# Altium schematic symbol library SG2002_QFN88_38_20230301_4L_V1.3_16.2_Library.SchLib: 126 symbols (part 5 of 5)
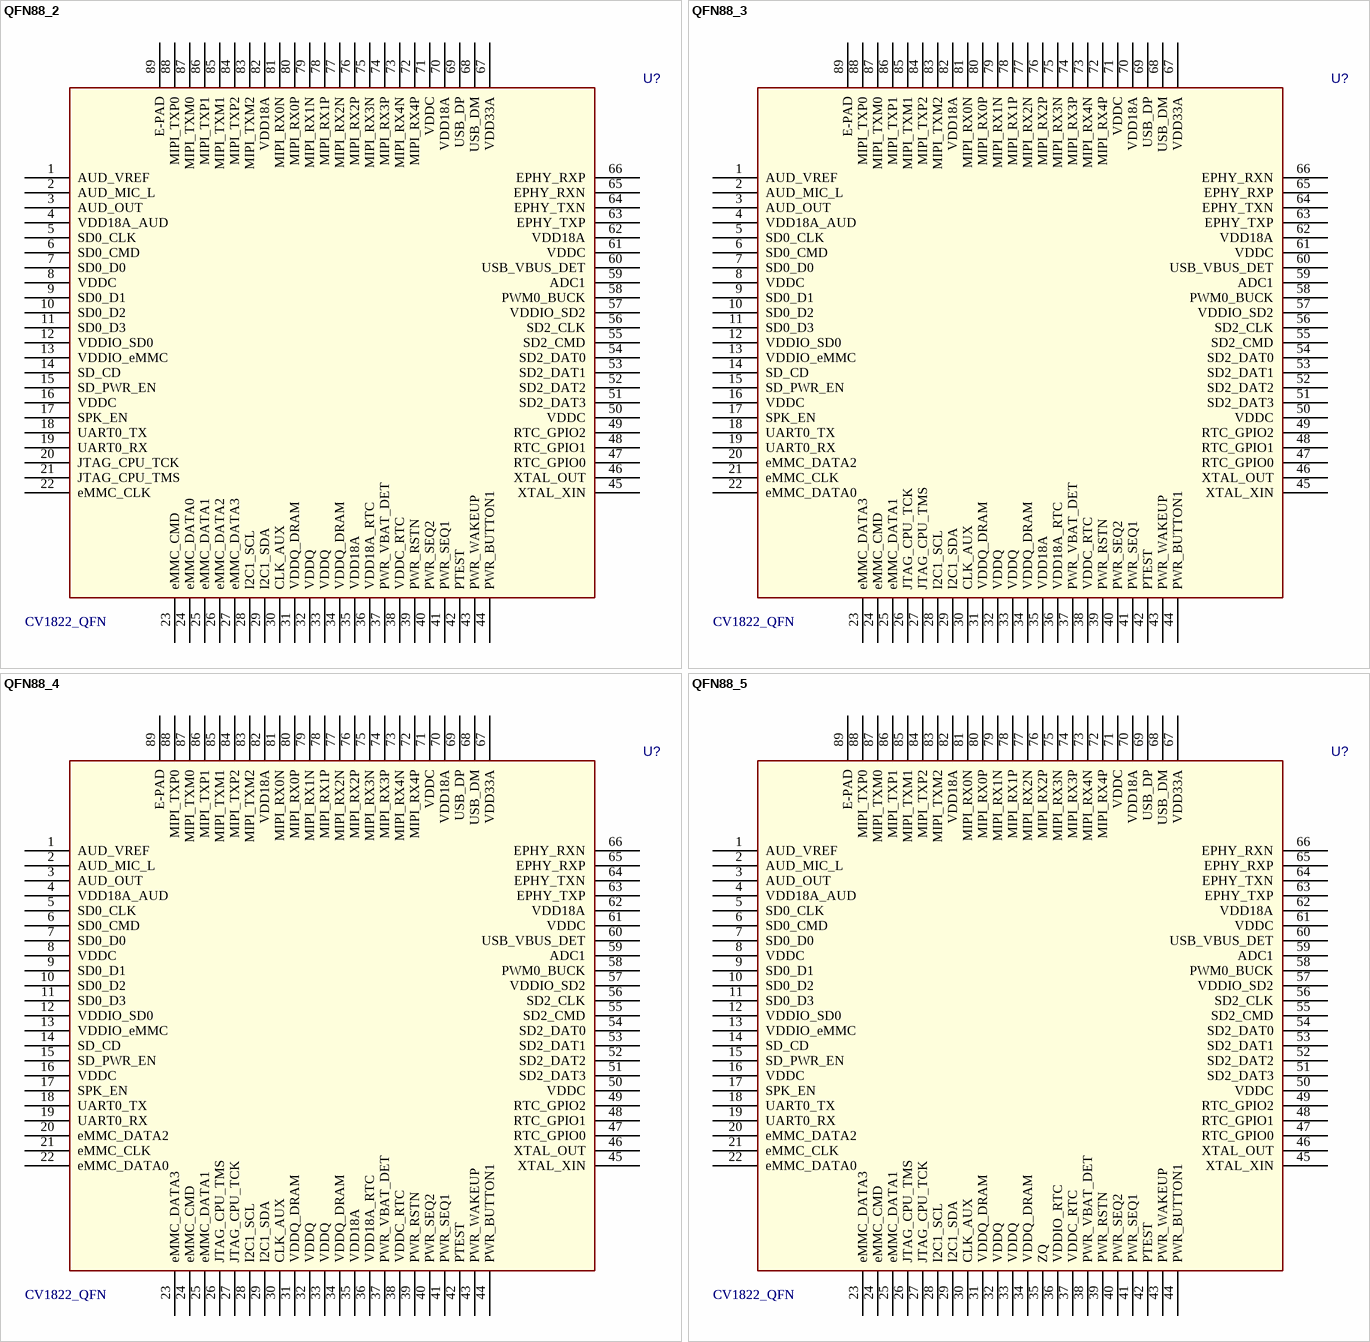
[diagram p53: symbols QFN88_2 to QFN88_5]

## QFN88_3
designator U?, comment CV1822_QFN
Value: CV1822_QFN
pins: 1 AUD_VREF, 2 AUD_MIC_L, 3 AUD_OUT, 4 VDD18A_AUD, 5 SD0_CLK, 6 SD0_CMD, 7 SD0_D0, 8 VDDC, 9 SD0_D1, 10 SD0_D2, 11 SD0_D3, 12 VDDIO_SD0, 13 VDDIO_eMMC, 14 SD_CD, 15 SD_PWR_EN, 16 VDDC, 17 SPK_EN, 18 UART0_TX, 19 UART0_RX, 20 eMMC_DATA2, 21 eMMC_CLK, 22 eMMC_DATA0, 23 eMMC_DATA3, 24 eMMC_CMD, 25 eMMC_DATA1, 26 JTAG_CPU_TCK, 27 JTAG_CPU_TMS, 28 I2C1_SCL, 29 I2C1_SDA, 30 CLK_AUX, 31 VDDQ_DRAM, 32 VDDQ, 33 VDDQ, 34 VDDQ_DRAM, 35 VDD18A, 36 VDD18A_RTC, 37 PWR_VBAT_DET, 38 VDDC_RTC, 39 PWR_RSTN, 40 PWR_SEQ2, 41 PWR_SEQ1, 42 PTEST, 43 PWR_WAKEUP, 44 PWR_BUTTON1, 45 XTAL_XIN, 46 XTAL_OUT, 47 RTC_GPIO0, 48 RTC_GPIO1, 49 RTC_GPIO2, 50 VDDC, 51 SD2_DAT3, 52 SD2_DAT2, 53 SD2_DAT1, 54 SD2_DAT0, 55 SD2_CMD, 56 SD2_CLK, 57 VDDIO_SD2, 58 PWM0_BUCK, 59 ADC1, 60 USB_VBUS_DET, 61 VDDC, 62 VDD18A, 63 EPHY_TXP, 64 EPHY_TXN, 65 EPHY_RXP, 66 EPHY_RXN, 67 VDD33A, 68 USB_DM, 69 USB_DP, 70 VDD18A, 71 VDDC, 72 MIPI_RX4P, 73 MIPI_RX4N, 74 MIPI_RX3P, 75 MIPI_RX3N, 76 MIPI_RX2P, 77 MIPI_RX2N, 78 MIPI_RX1P, 79 MIPI_RX1N, 80 MIPI_RX0P, 81 MIPI_RX0N, 82 VDD18A, 83 MIPI_TXM2, 84 MIPI_TXP2, 85 MIPI_TXM1, 86 MIPI_TXP1, 87 MIPI_TXM0, 88 MIPI_TXP0, 89 E-PAD

## QFN88_4
designator U?, comment CV1822_QFN
Value: CV1822_QFN
pins: 1 AUD_VREF, 2 AUD_MIC_L, 3 AUD_OUT, 4 VDD18A_AUD, 5 SD0_CLK, 6 SD0_CMD, 7 SD0_D0, 8 VDDC, 9 SD0_D1, 10 SD0_D2, 11 SD0_D3, 12 VDDIO_SD0, 13 VDDIO_eMMC, 14 SD_CD, 15 SD_PWR_EN, 16 VDDC, 17 SPK_EN, 18 UART0_TX, 19 UART0_RX, 20 eMMC_DATA2, 21 eMMC_CLK, 22 eMMC_DATA0, 23 eMMC_DATA3, 24 eMMC_CMD, 25 eMMC_DATA1, 26 JTAG_CPU_TMS, 27 JTAG_CPU_TCK, 28 I2C1_SCL, 29 I2C1_SDA, 30 CLK_AUX, 31 VDDQ_DRAM, 32 VDDQ, 33 VDDQ, 34 VDDQ_DRAM, 35 VDD18A, 36 VDD18A_RTC, 37 PWR_VBAT_DET, 38 VDDC_RTC, 39 PWR_RSTN, 40 PWR_SEQ2, 41 PWR_SEQ1, 42 PTEST, 43 PWR_WAKEUP, 44 PWR_BUTTON1, 45 XTAL_XIN, 46 XTAL_OUT, 47 RTC_GPIO0, 48 RTC_GPIO1, 49 RTC_GPIO2, 50 VDDC, 51 SD2_DAT3, 52 SD2_DAT2, 53 SD2_DAT1, 54 SD2_DAT0, 55 SD2_CMD, 56 SD2_CLK, 57 VDDIO_SD2, 58 PWM0_BUCK, 59 ADC1, 60 USB_VBUS_DET, 61 VDDC, 62 VDD18A, 63 EPHY_TXP, 64 EPHY_TXN, 65 EPHY_RXP, 66 EPHY_RXN, 67 VDD33A, 68 USB_DM, 69 USB_DP, 70 VDD18A, 71 VDDC, 72 MIPI_RX4P, 73 MIPI_RX4N, 74 MIPI_RX3P, 75 MIPI_RX3N, 76 MIPI_RX2P, 77 MIPI_RX2N, 78 MIPI_RX1P, 79 MIPI_RX1N, 80 MIPI_RX0P, 81 MIPI_RX0N, 82 VDD18A, 83 MIPI_TXM2, 84 MIPI_TXP2, 85 MIPI_TXM1, 86 MIPI_TXP1, 87 MIPI_TXM0, 88 MIPI_TXP0, 89 E-PAD

## QFN88_5
designator U?, comment CV1822_QFN
Value: CV1822_QFN
pins: 1 AUD_VREF, 2 AUD_MIC_L, 3 AUD_OUT, 4 VDD18A_AUD, 5 SD0_CLK, 6 SD0_CMD, 7 SD0_D0, 8 VDDC, 9 SD0_D1, 10 SD0_D2, 11 SD0_D3, 12 VDDIO_SD0, 13 VDDIO_eMMC, 14 SD_CD, 15 SD_PWR_EN, 16 VDDC, 17 SPK_EN, 18 UART0_TX, 19 UART0_RX, 20 eMMC_DATA2, 21 eMMC_CLK, 22 eMMC_DATA0, 23 eMMC_DATA3, 24 eMMC_CMD, 25 eMMC_DATA1, 26 JTAG_CPU_TMS, 27 JTAG_CPU_TCK, 28 I2C1_SCL, 29 I2C1_SDA, 30 CLK_AUX, 31 VDDQ_DRAM, 32 VDDQ, 33 VDDQ, 34 VDDQ_DRAM, 35 ZQ, 36 VDDIO_RTC, 37 VDDC_RTC, 38 PWR_VBAT_DET, 39 PWR_RSTN, 40 PWR_SEQ2, 41 PWR_SEQ1, 42 PTEST, 43 PWR_WAKEUP, 44 PWR_BUTTON1, 45 XTAL_XIN, 46 XTAL_OUT, 47 RTC_GPIO0, 48 RTC_GPIO1, 49 RTC_GPIO2, 50 VDDC, 51 SD2_DAT3, 52 SD2_DAT2, 53 SD2_DAT1, 54 SD2_DAT0, 55 SD2_CMD, 56 SD2_CLK, 57 VDDIO_SD2, 58 PWM0_BUCK, 59 ADC1, 60 USB_VBUS_DET, 61 VDDC, 62 VDD18A, 63 EPHY_TXP, 64 EPHY_TXN, 65 EPHY_RXP, 66 EPHY_RXN, 67 VDD33A, 68 USB_DM, 69 USB_DP, 70 VDD18A, 71 VDDC, 72 MIPI_RX4P, 73 MIPI_RX4N, 74 MIPI_RX3P, 75 MIPI_RX3N, 76 MIPI_RX2P, 77 MIPI_RX2N, 78 MIPI_RX1P, 79 MIPI_RX1N, 80 MIPI_RX0P, 81 MIPI_RX0N, 82 VDD18A, 83 MIPI_TXM2, 84 MIPI_TXP2, 85 MIPI_TXM1, 86 MIPI_TXP1, 87 MIPI_TXM0, 88 MIPI_TXP0, 89 E-PAD

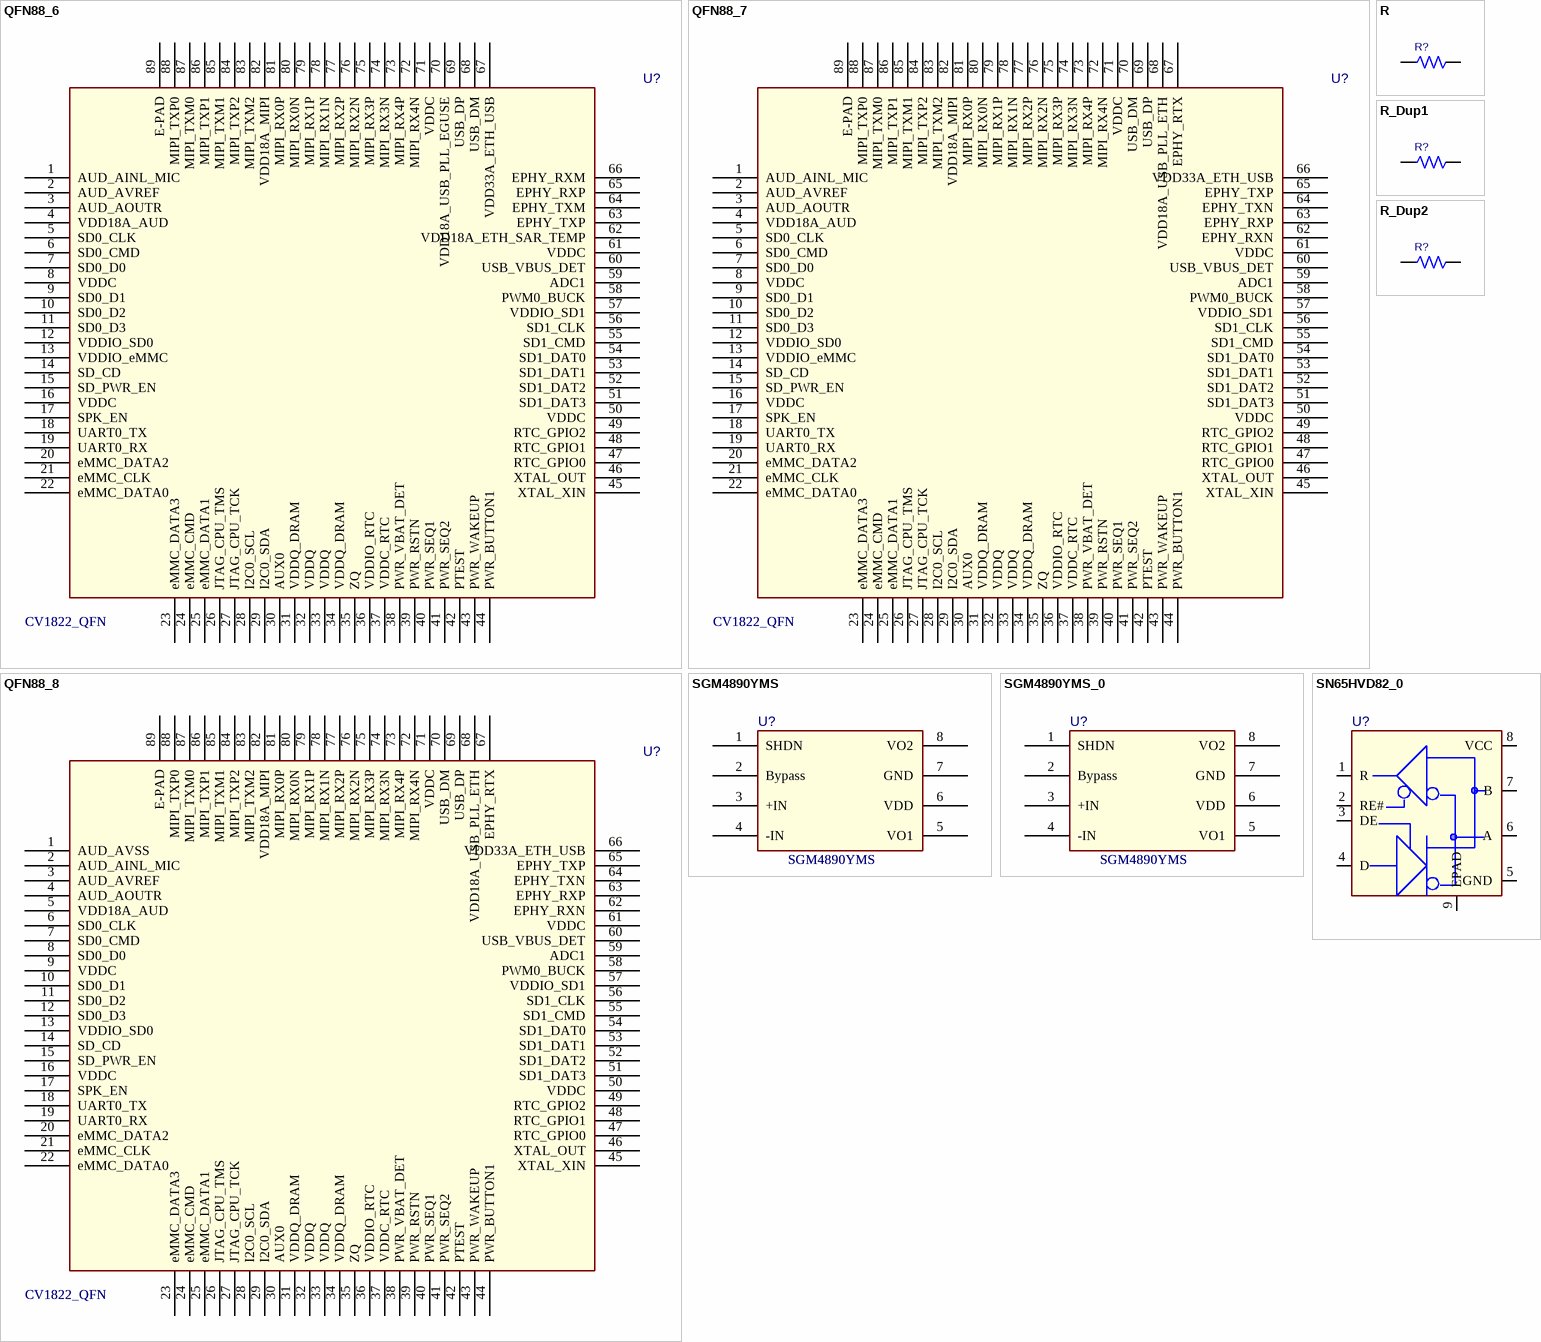
[diagram p46: symbols QFN88_6 to SN65HVD82_0]

## QFN88_6
designator U?, comment CV1822_QFN
Value: CV1822_QFN
pins: 1 AUD_AINL_MIC, 2 AUD_AVREF, 3 AUD_AOUTR, 4 VDD18A_AUD, 5 SD0_CLK, 6 SD0_CMD, 7 SD0_D0, 8 VDDC, 9 SD0_D1, 10 SD0_D2, 11 SD0_D3, 12 VDDIO_SD0, 13 VDDIO_eMMC, 14 SD_CD, 15 SD_PWR_EN, 16 VDDC, 17 SPK_EN, 18 UART0_TX, 19 UART0_RX, 20 eMMC_DATA2, 21 eMMC_CLK, 22 eMMC_DATA0, 23 eMMC_DATA3, 24 eMMC_CMD, 25 eMMC_DATA1, 26 JTAG_CPU_TMS, 27 JTAG_CPU_TCK, 28 I2C0_SCL, 29 I2C0_SDA, 30 AUX0, 31 VDDQ_DRAM, 32 VDDQ, 33 VDDQ, 34 VDDQ_DRAM, 35 ZQ, 36 VDDIO_RTC, 37 VDDC_RTC, 38 PWR_VBAT_DET, 39 PWR_RSTN, 40 PWR_SEQ1, 41 PWR_SEQ2, 42 PTEST, 43 PWR_WAKEUP, 44 PWR_BUTTON1, 45 XTAL_XIN, 46 XTAL_OUT, 47 RTC_GPIO0, 48 RTC_GPIO1, 49 RTC_GPIO2, 50 VDDC, 51 SD1_DAT3, 52 SD1_DAT2, 53 SD1_DAT1, 54 SD1_DAT0, 55 SD1_CMD, 56 SD1_CLK, 57 VDDIO_SD1, 58 PWM0_BUCK, 59 ADC1, 60 USB_VBUS_DET, 61 VDDC, 62 VDD18A_ETH_SAR_TEMP, 63 EPHY_TXP, 64 EPHY_TXM, 65 EPHY_RXP, 66 EPHY_RXM, 67 VDD33A_ETH_USB, 68 USB_DM, 69 USB_DP, 70 VDD18A_USB_PLL_EGUSE, 71 VDDC, 72 MIPI_RX4N, 73 MIPI_RX4P, 74 MIPI_RX3N, 75 MIPI_RX3P, 76 MIPI_RX2N, 77 MIPI_RX2P, 78 MIPI_RX1N, 79 MIPI_RX1P, 80 MIPI_RX0N, 81 MIPI_RX0P, 82 VDD18A_MIPI, 83 MIPI_TXM2, 84 MIPI_TXP2, 85 MIPI_TXM1, 86 MIPI_TXP1, 87 MIPI_TXM0, 88 MIPI_TXP0, 89 E-PAD

## QFN88_7
designator U?, comment CV1822_QFN
Value: CV1822_QFN
pins: 1 AUD_AINL_MIC, 2 AUD_AVREF, 3 AUD_AOUTR, 4 VDD18A_AUD, 5 SD0_CLK, 6 SD0_CMD, 7 SD0_D0, 8 VDDC, 9 SD0_D1, 10 SD0_D2, 11 SD0_D3, 12 VDDIO_SD0, 13 VDDIO_eMMC, 14 SD_CD, 15 SD_PWR_EN, 16 VDDC, 17 SPK_EN, 18 UART0_TX, 19 UART0_RX, 20 eMMC_DATA2, 21 eMMC_CLK, 22 eMMC_DATA0, 23 eMMC_DATA3, 24 eMMC_CMD, 25 eMMC_DATA1, 26 JTAG_CPU_TMS, 27 JTAG_CPU_TCK, 28 I2C0_SCL, 29 I2C0_SDA, 30 AUX0, 31 VDDQ_DRAM, 32 VDDQ, 33 VDDQ, 34 VDDQ_DRAM, 35 ZQ, 36 VDDIO_RTC, 37 VDDC_RTC, 38 PWR_VBAT_DET, 39 PWR_RSTN, 40 PWR_SEQ1, 41 PWR_SEQ2, 42 PTEST, 43 PWR_WAKEUP, 44 PWR_BUTTON1, 45 XTAL_XIN, 46 XTAL_OUT, 47 RTC_GPIO0, 48 RTC_GPIO1, 49 RTC_GPIO2, 50 VDDC, 51 SD1_DAT3, 52 SD1_DAT2, 53 SD1_DAT1, 54 SD1_DAT0, 55 SD1_CMD, 56 SD1_CLK, 57 VDDIO_SD1, 58 PWM0_BUCK, 59 ADC1, 60 USB_VBUS_DET, 61 VDDC, 62 EPHY_RXN, 63 EPHY_RXP, 64 EPHY_TXN, 65 EPHY_TXP, 66 VDD33A_ETH_USB, 67 EPHY_RTX, 68 VDD18A_USB_PLL_ETH, 69 USB_DP, 70 USB_DM, 71 VDDC, 72 MIPI_RX4N, 73 MIPI_RX4P, 74 MIPI_RX3N, 75 MIPI_RX3P, 76 MIPI_RX2N, 77 MIPI_RX2P, 78 MIPI_RX1N, 79 MIPI_RX1P, 80 MIPI_RX0N, 81 MIPI_RX0P, 82 VDD18A_MIPI, 83 MIPI_TXM2, 84 MIPI_TXP2, 85 MIPI_TXM1, 86 MIPI_TXP1, 87 MIPI_TXM0, 88 MIPI_TXP0, 89 E-PAD

## QFN88_8
designator U?, comment CV1822_QFN
Value: CV1822_QFN
pins: 1 AUD_AVSS, 2 AUD_AINL_MIC, 3 AUD_AVREF, 4 AUD_AOUTR, 5 VDD18A_AUD, 6 SD0_CLK, 7 SD0_CMD, 8 SD0_D0, 9 VDDC, 10 SD0_D1, 11 SD0_D2, 12 SD0_D3, 13 VDDIO_SD0, 14 SD_CD, 15 SD_PWR_EN, 16 VDDC, 17 SPK_EN, 18 UART0_TX, 19 UART0_RX, 20 eMMC_DATA2, 21 eMMC_CLK, 22 eMMC_DATA0, 23 eMMC_DATA3, 24 eMMC_CMD, 25 eMMC_DATA1, 26 JTAG_CPU_TMS, 27 JTAG_CPU_TCK, 28 I2C0_SCL, 29 I2C0_SDA, 30 AUX0, 31 VDDQ_DRAM, 32 VDDQ, 33 VDDQ, 34 VDDQ_DRAM, 35 ZQ, 36 VDDIO_RTC, 37 VDDC_RTC, 38 PWR_VBAT_DET, 39 PWR_RSTN, 40 PWR_SEQ1, 41 PWR_SEQ2, 42 PTEST, 43 PWR_WAKEUP, 44 PWR_BUTTON1, 45 XTAL_XIN, 46 XTAL_OUT, 47 RTC_GPIO0, 48 RTC_GPIO1, 49 RTC_GPIO2, 50 VDDC, 51 SD1_DAT3, 52 SD1_DAT2, 53 SD1_DAT1, 54 SD1_DAT0, 55 SD1_CMD, 56 SD1_CLK, 57 VDDIO_SD1, 58 PWM0_BUCK, 59 ADC1, 60 USB_VBUS_DET, 61 VDDC, 62 EPHY_RXN, 63 EPHY_RXP, 64 EPHY_TXN, 65 EPHY_TXP, 66 VDD33A_ETH_USB, 67 EPHY_RTX, 68 VDD18A_USB_PLL_ETH, 69 USB_DP, 70 USB_DM, 71 VDDC, 72 MIPI_RX4N, 73 MIPI_RX4P, 74 MIPI_RX3N, 75 MIPI_RX3P, 76 MIPI_RX2N, 77 MIPI_RX2P, 78 MIPI_RX1N, 79 MIPI_RX1P, 80 MIPI_RX0N, 81 MIPI_RX0P, 82 VDD18A_MIPI, 83 MIPI_TXM2, 84 MIPI_TXP2, 85 MIPI_TXM1, 86 MIPI_TXP1, 87 MIPI_TXM0, 88 MIPI_TXP0, 89 E-PAD

## R
designator R?
footprint R0402
pins: 1, 2

## R_Dup1
designator R?
pins: 1, 2

## R_Dup2
designator R?
pins: 1, 2

## SGM4890YMS
designator U?
Value: SGM4890YMS
pins: 1 SHDN, 2 Bypass, 3 +IN, 4 -IN, 5 VO1, 6 VDD, 7 GND, 8 VO2

## SGM4890YMS_0
designator U?, comment SGM4890YMS
Value: SGM4890YMS
pins: 1 SHDN, 2 Bypass, 3 +IN, 4 -IN, 5 VO1, 6 VDD, 7 GND, 8 VO2

## SN65HVD82_0
designator U?
footprint SOP8
pins: 1 R, 2 RE#, 3 DE, 4 D, 5 GND, 6 A, 7 B, 8 VCC, 9 EPAD

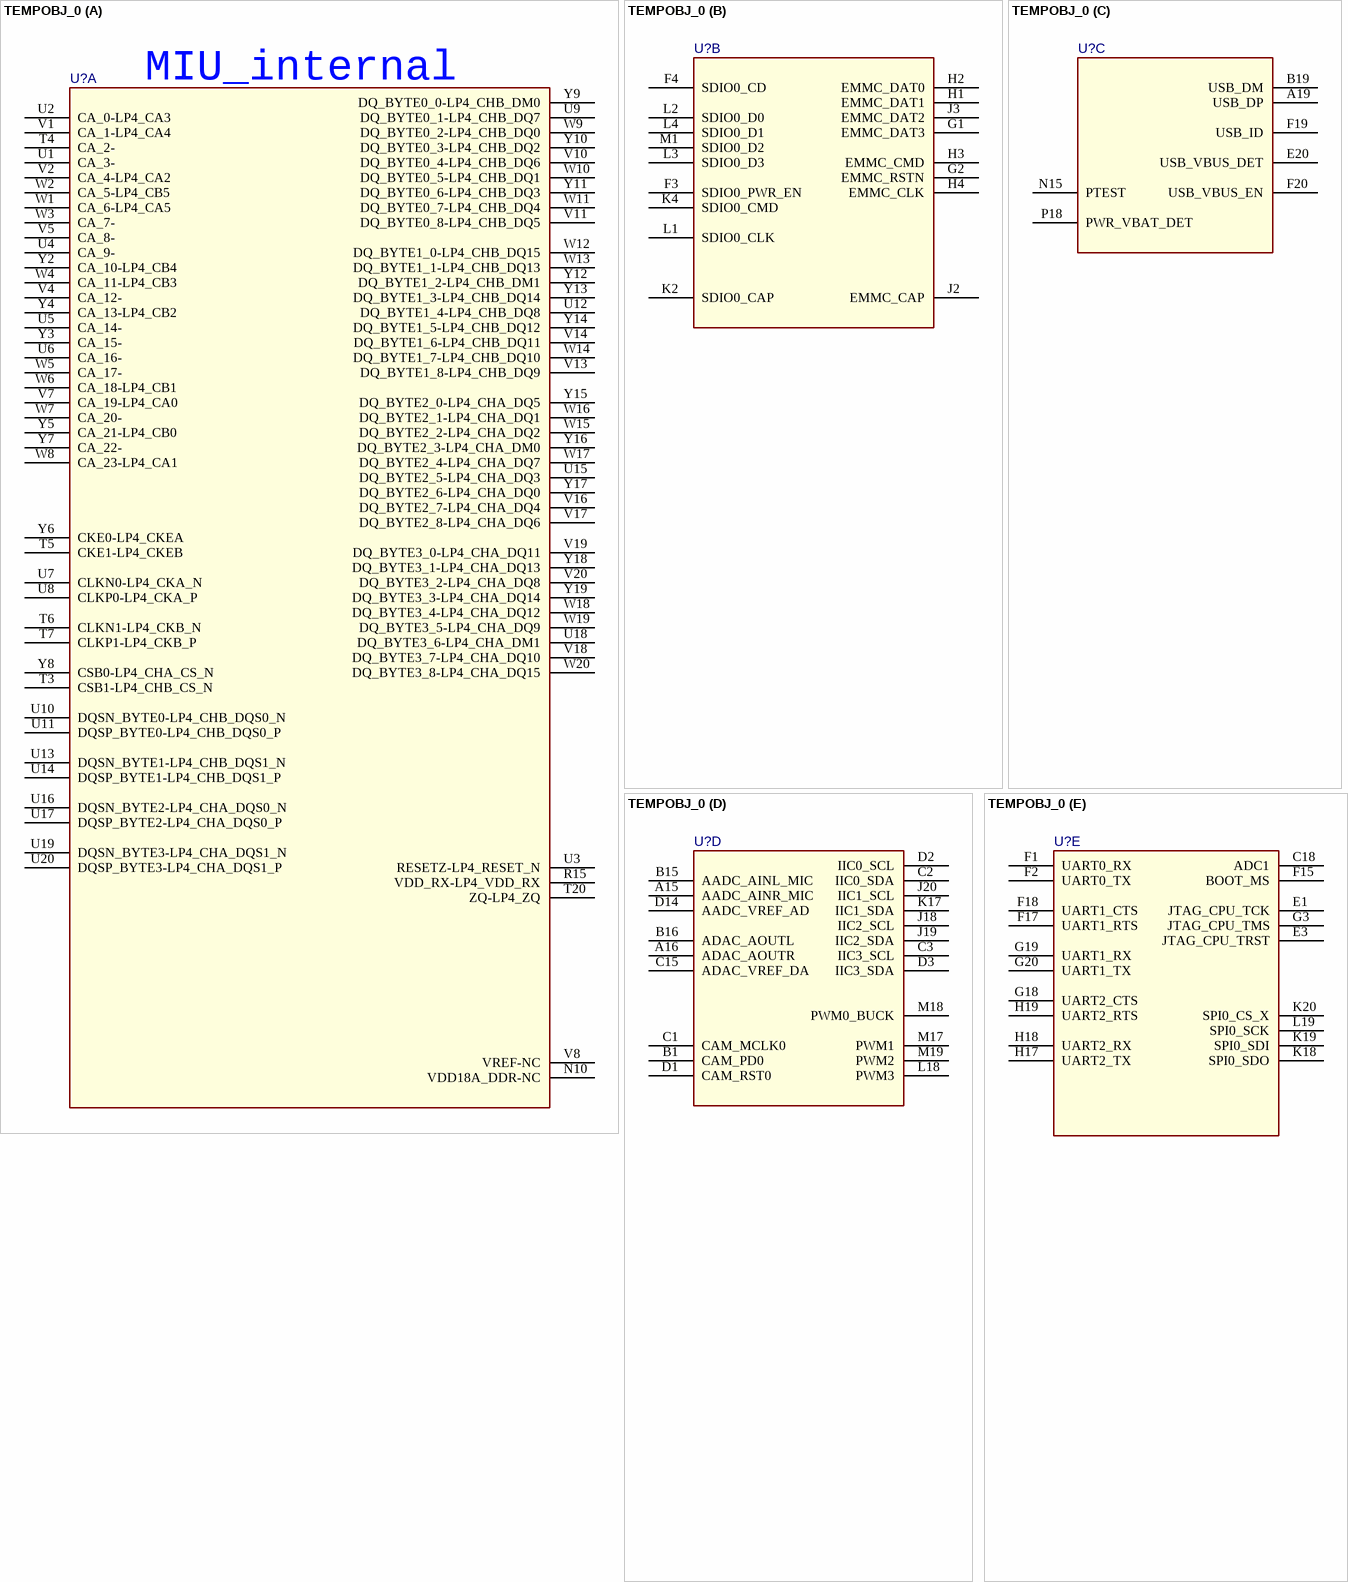
[diagram p47: symbol TEMPOBJ_0]

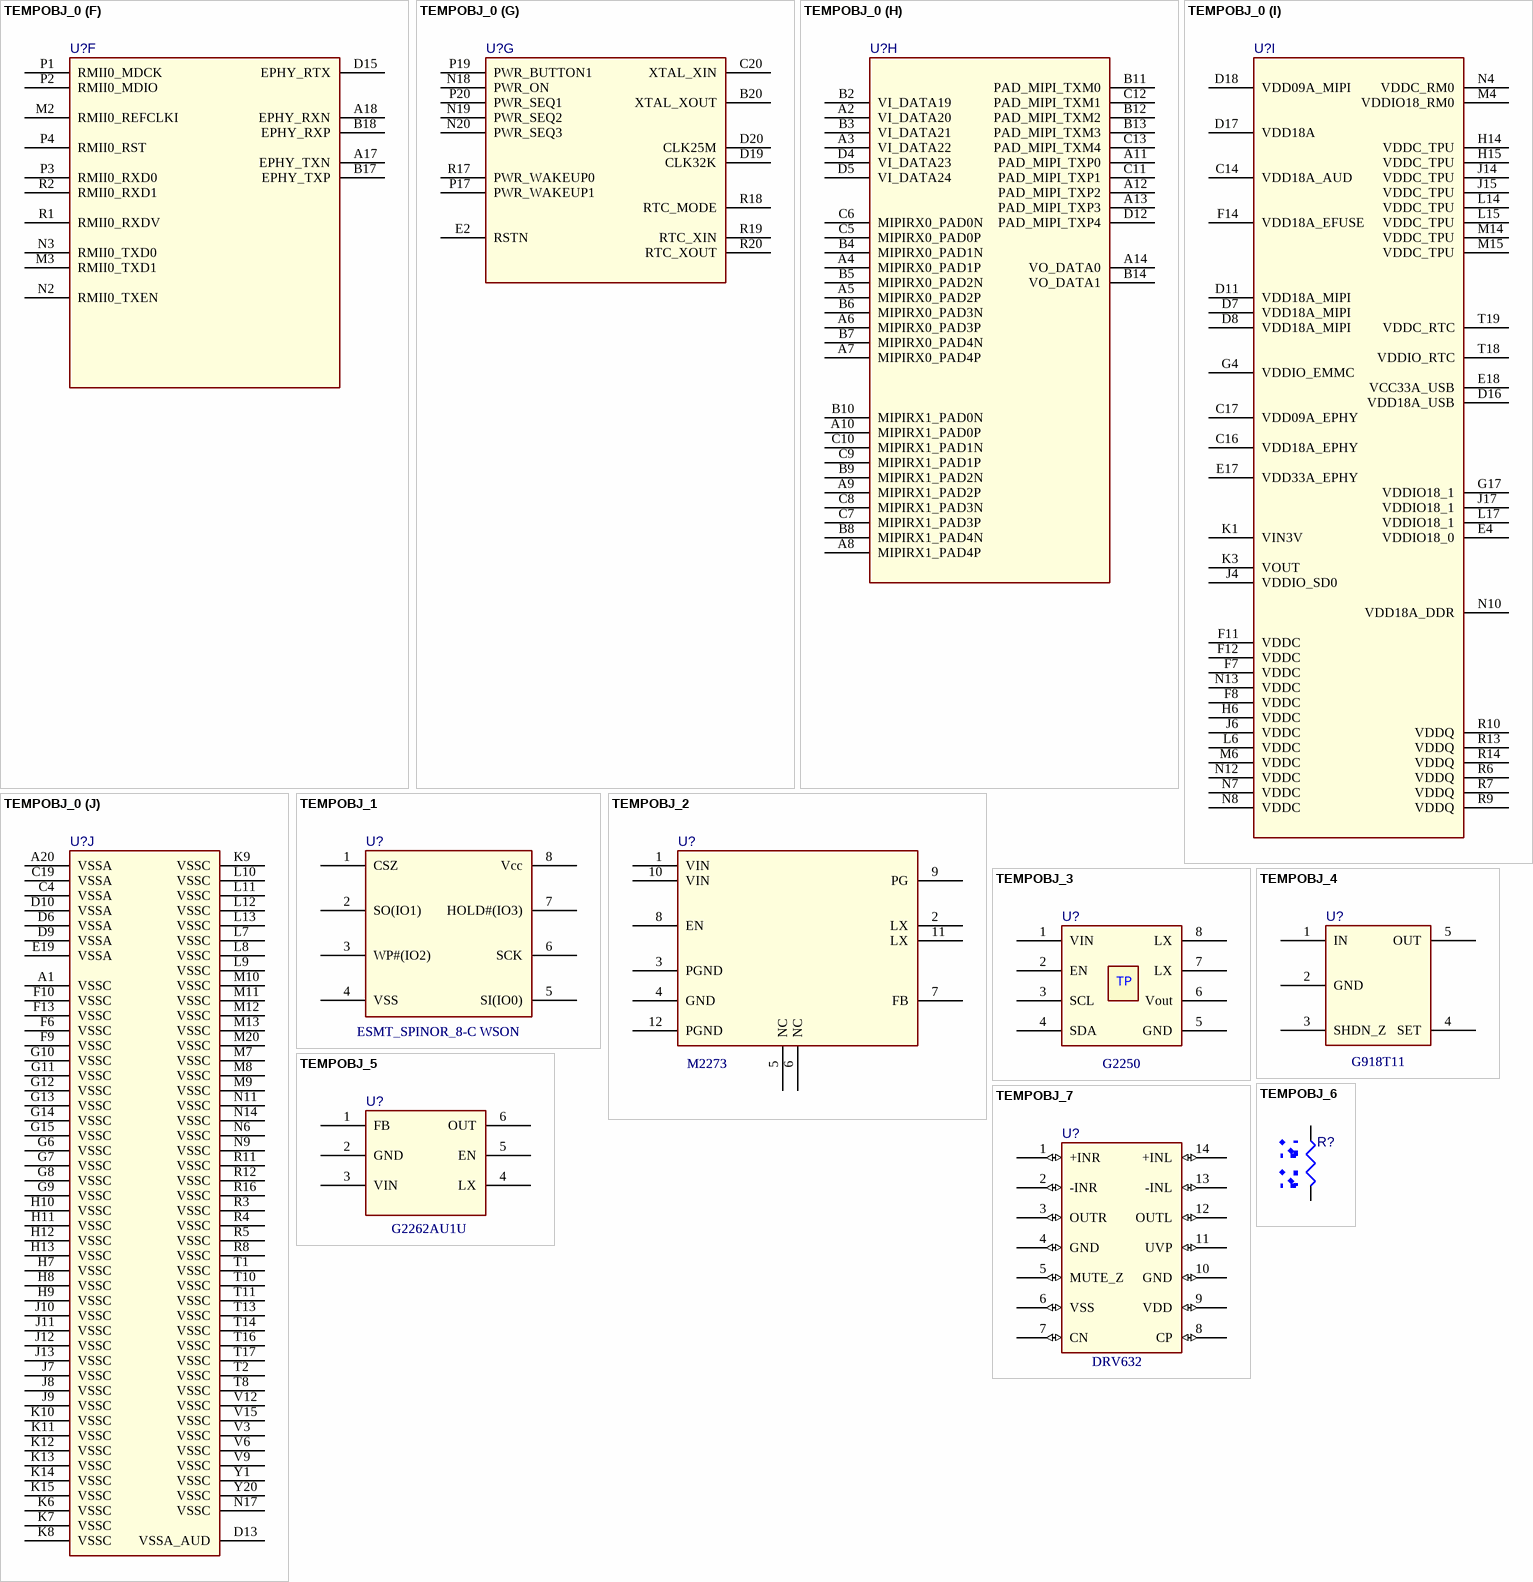
[diagram p48: symbols TEMPOBJ_0 to TEMPOBJ_7]

## TEMPOBJ_0
designator U?
SWAP_INFO: (S1+S2+S3+S4+S5+S6+S7+S8+S9+S10); SPLIT_INST: TRUE
footprint BGA378-26-2121-socket
part A pins: N10 VDD18A_DDR-NC, R15 VDD_RX-LP4_VDD_RX, T3 CSB1-LP4_CHB_CS_N, T4 CA_2-, T5 CKE1-LP4_CKEB, T6 CLKN1-LP4_CKB_N, T7 CLKP1-LP4_CKB_P, T20 ZQ-LP4_ZQ, U1 CA_3-, U2 CA_0-LP4_CA3, U3 RESETZ-LP4_RESET_N, U4 CA_9-, U5 CA_14-, U6 CA_16-, U7 CLKN0-LP4_CKA_N, U8 CLKP0-LP4_CKA_P, U9 DQ_BYTE0_1-LP4_CHB_DQ7, U10 DQSN_BYTE0-LP4_CHB_DQS0_N, U11 DQSP_BYTE0-LP4_CHB_DQS0_P, U12 DQ_BYTE1_4-LP4_CHB_DQ8, U13 DQSN_BYTE1-LP4_CHB_DQS1_N, U14 DQSP_BYTE1-LP4_CHB_DQS1_P, U15 DQ_BYTE2_5-LP4_CHA_DQ3, U16 DQSN_BYTE2-LP4_CHA_DQS0_N, U17 DQSP_BYTE2-LP4_CHA_DQS0_P, U18 DQ_BYTE3_6-LP4_CHA_DM1, U19 DQSN_BYTE3-LP4_CHA_DQS1_N, U20 DQSP_BYTE3-LP4_CHA_DQS1_P, V1 CA_1-LP4_CA4, V2 CA_4-LP4_CA2, V4 CA_12-, V5 CA_8-, V7 CA_19-LP4_CA0, V8 VREF-NC, V10 DQ_BYTE0_4-LP4_CHB_DQ6, V11 DQ_BYTE0_8-LP4_CHB_DQ5, V13 DQ_BYTE1_8-LP4_CHB_DQ9, V14 DQ_BYTE1_6-LP4_CHB_DQ11, V16 DQ_BYTE2_7-LP4_CHA_DQ4, V17 DQ_BYTE2_8-LP4_CHA_DQ6, V18 DQ_BYTE3_7-LP4_CHA_DQ10, V19 DQ_BYTE3_0-LP4_CHA_DQ11, V20 DQ_BYTE3_2-LP4_CHA_DQ8, W1 CA_6-LP4_CA5, W2 CA_5-LP4_CB5, W3 CA_7-, W4 CA_11-LP4_CB3, W5 CA_17-, W6 CA_18-LP4_CB1, W7 CA_20-, W8 CA_23-LP4_CA1, W9 DQ_BYTE0_2-LP4_CHB_DQ0, W10 DQ_BYTE0_5-LP4_CHB_DQ1, W11 DQ_BYTE0_7-LP4_CHB_DQ4, W12 DQ_BYTE1_0-LP4_CHB_DQ15, W13 DQ_BYTE1_1-LP4_CHB_DQ13, W14 DQ_BYTE1_7-LP4_CHB_DQ10, W15 DQ_BYTE2_2-LP4_CHA_DQ2, W16 DQ_BYTE2_1-LP4_CHA_DQ1, W17 DQ_BYTE2_4-LP4_CHA_DQ7, W18 DQ_BYTE3_4-LP4_CHA_DQ12, W19 DQ_BYTE3_5-LP4_CHA_DQ9, W20 DQ_BYTE3_8-LP4_CHA_DQ15, Y2 CA_10-LP4_CB4, Y3 CA_15-, Y4 CA_13-LP4_CB2, Y5 CA_21-LP4_CB0, Y6 CKE0-LP4_CKEA, Y7 CA_22-, Y8 CSB0-LP4_CHA_CS_N, Y9 DQ_BYTE0_0-LP4_CHB_DM0, Y10 DQ_BYTE0_3-LP4_CHB_DQ2, Y11 DQ_BYTE0_6-LP4_CHB_DQ3, Y12 DQ_BYTE1_2-LP4_CHB_DM1, Y13 DQ_BYTE1_3-LP4_CHB_DQ14, Y14 DQ_BYTE1_5-LP4_CHB_DQ12, Y15 DQ_BYTE2_0-LP4_CHA_DQ5, Y16 DQ_BYTE2_3-LP4_CHA_DM0, Y17 DQ_BYTE2_6-LP4_CHA_DQ0, Y18 DQ_BYTE3_1-LP4_CHA_DQ13, Y19 DQ_BYTE3_3-LP4_CHA_DQ14
part B pins: F3 SDIO0_PWR_EN, F4 SDIO0_CD, G1 EMMC_DAT3, G2 EMMC_RSTN, H1 EMMC_DAT1, H2 EMMC_DAT0, H3 EMMC_CMD, H4 EMMC_CLK, J2 EMMC_CAP, J3 EMMC_DAT2, K2 SDIO0_CAP, K4 SDIO0_CMD, L1 SDIO0_CLK, L2 SDIO0_D0, L3 SDIO0_D3, L4 SDIO0_D1, M1 SDIO0_D2
part C pins: A19 USB_DP (power), B19 USB_DM (power), E20 USB_VBUS_DET (power), F19 USB_ID (power), F20 USB_VBUS_EN, N15 PTEST, P18 PWR_VBAT_DET
part D pins: A15 AADC_AINR_MIC, A16 ADAC_AOUTR, B1 CAM_PD0, B15 AADC_AINL_MIC, B16 ADAC_AOUTL, C1 CAM_MCLK0, C2 IIC0_SDA, C3 IIC3_SCL, C15 ADAC_VREF_DA, D1 CAM_RST0, D2 IIC0_SCL, D3 IIC3_SDA, D14 AADC_VREF_AD, J18 IIC2_SCL, J19 IIC2_SDA, J20 IIC1_SCL, K17 IIC1_SDA, L18 PWM3, M17 PWM1, M18 PWM0_BUCK, M19 PWM2
part E pins: C18 ADC1, E1 JTAG_CPU_TCK, E3 JTAG_CPU_TRST, F1 UART0_RX, F2 UART0_TX, F15 BOOT_MS, F17 UART1_RTS, F18 UART1_CTS, G3 JTAG_CPU_TMS, G18 UART2_CTS, G19 UART1_RX, G20 UART1_TX, H17 UART2_TX, H18 UART2_RX, H19 UART2_RTS, K18 SPI0_SDO, K19 SPI0_SDI, K20 SPI0_CS_X, L19 SPI0_SCK
part F pins: A17 EPHY_TXN, A18 EPHY_RXN, B17 EPHY_TXP, B18 EPHY_RXP, D15 EPHY_RTX, M2 RMII0_REFCLKI, M3 RMII0_TXD1, N2 RMII0_TXEN, N3 RMII0_TXD0, P1 RMII0_MDCK, P2 RMII0_MDIO, P3 RMII0_RXD0, P4 RMII0_RST, R1 RMII0_RXDV, R2 RMII0_RXD1
part G pins: B20 XTAL_XOUT, C20 XTAL_XIN, D19 CLK32K, D20 CLK25M, E2 RSTN, N18 PWR_ON, N19 PWR_SEQ2, N20 PWR_SEQ3, P17 PWR_WAKEUP1, P19 PWR_BUTTON1, P20 PWR_SEQ1, R17 PWR_WAKEUP0, R18 RTC_MODE, R19 RTC_XIN, R20 RTC_XOUT
part H pins: A2 VI_DATA20 (power), A3 VI_DATA22 (power), A4 MIPIRX0_PAD1P (power), A5 MIPIRX0_PAD2P (power), A6 MIPIRX0_PAD3P (power), A7 MIPIRX0_PAD4P (power), A8 MIPIRX1_PAD4P (power), A9 MIPIRX1_PAD2P (power), A10 MIPIRX1_PAD0P (power), A11 PAD_MIPI_TXP0 (power), A12 PAD_MIPI_TXP2 (power), A13 PAD_MIPI_TXP3 (power), A14 VO_DATA0 (power), B2 VI_DATA19 (power), B3 VI_DATA21 (power), B4 MIPIRX0_PAD1N (power), B5 MIPIRX0_PAD2N (power), B6 MIPIRX0_PAD3N (power), B7 MIPIRX0_PAD4N (power), B8 MIPIRX1_PAD4N (power), B9 MIPIRX1_PAD2N (power), B10 MIPIRX1_PAD0N (power), B11 PAD_MIPI_TXM0 (power), B12 PAD_MIPI_TXM2 (power), B13 PAD_MIPI_TXM3 (power), B14 VO_DATA1 (power), C5 MIPIRX0_PAD0P (power), C6 MIPIRX0_PAD0N (power), C7 MIPIRX1_PAD3P (power), C8 MIPIRX1_PAD3N (power), C9 MIPIRX1_PAD1P (power), C10 MIPIRX1_PAD1N (power), C11 PAD_MIPI_TXP1 (power), C12 PAD_MIPI_TXM1 (power), C13 PAD_MIPI_TXM4 (power), D4 VI_DATA23 (power), D5 VI_DATA24 (power), D12 PAD_MIPI_TXP4 (power)
part I pins: C14 VDD18A_AUD (power), C16 VDD18A_EPHY (power), C17 VDD09A_EPHY (power), D7 VDD18A_MIPI (power), D8 VDD18A_MIPI (power), D11 VDD18A_MIPI (power), D16 VDD18A_USB, D17 VDD18A (power), D18 VDD09A_MIPI (power), E4 VDDIO18_0 (power), E17 VDD33A_EPHY (power), E18 VCC33A_USB, F7 VDDC (power), F8 VDDC (power), F11 VDDC (power), F12 VDDC (power), F14 VDD18A_EFUSE (power), G4 VDDIO_EMMC (power), G17 VDDIO18_1 (power), H6 VDDC (power), H14 VDDC_TPU (power), H15 VDDC_TPU (power), J4 VDDIO_SD0 (power), J6 VDDC (power), J14 VDDC_TPU (power), J15 VDDC_TPU (power), J17 VDDIO18_1 (power), K1 VIN3V (power), K3 VOUT (power), L6 VDDC (power), L14 VDDC_TPU (power), L15 VDDC_TPU (power), L17 VDDIO18_1 (power), M4 VDDIO18_RM0 (power), M6 VDDC (power), M14 VDDC_TPU (power), M15 VDDC_TPU (power), N4 VDDC_RM0 (power), N7 VDDC (power), N8 VDDC (power), N10 VDD18A_DDR (power), N12 VDDC (power), N13 VDDC (power), R6 VDDQ (power), R7 VDDQ (power), R9 VDDQ (power), R10 VDDQ (power), R13 VDDQ (power), R14 VDDQ (power), T18 VDDIO_RTC (power), T19 VDDC_RTC (power)
part J pins: A1 VSSC (power), A20 VSSA (power), C4 VSSA (power), C19 VSSA (power), D6 VSSA (power), D9 VSSA (power), D10 VSSA (power), D13 VSSA_AUD (power), E19 VSSA (power), F6 VSSC (power), F9 VSSC (power), F10 VSSC (power), F13 VSSC (power), G6 VSSC (power), G7 VSSC (power), G8 VSSC (power), G9 VSSC (power), G10 VSSC (power), G11 VSSC (power), G12 VSSC (power), G13 VSSC (power), G14 VSSC (power), G15 VSSC (power), H7 VSSC (power), H8 VSSC (power), H9 VSSC (power), H10 VSSC (power), H11 VSSC (power), H12 VSSC (power), H13 VSSC (power), J7 VSSC (power), J8 VSSC (power), J9 VSSC (power), J10 VSSC (power), J11 VSSC (power), J12 VSSC (power), J13 VSSC (power), K6 VSSC (power), K7 VSSC (power), K8 VSSC (power), K9 VSSC (power), K10 VSSC (power), K11 VSSC (power), K12 VSSC (power), K13 VSSC (power), K14 VSSC (power), K15 VSSC (power), L7 VSSC (power), L8 VSSC (power), L9 VSSC (power), L10 VSSC (power), L11 VSSC (power), L12 VSSC (power), L13 VSSC (power), M7 VSSC (power), M8 VSSC (power), M9 VSSC (power), M10 VSSC (power), M11 VSSC (power), M12 VSSC (power), M13 VSSC (power), M20 VSSC (power), N6 VSSC (power), N9 VSSC (power), N11 VSSC (power), N14 VSSC (power), N17 VSSC (power), R3 VSSC (power), R4 VSSC (power), R5 VSSC (power), R8 VSSC (power), R11 VSSC (power), R12 VSSC (power), R16 VSSC (power), T1 VSSC (power), T2 VSSC (power), T8 VSSC (power), T10 VSSC (power), T11 VSSC (power), T13 VSSC (power), T14 VSSC (power), T16 VSSC (power), T17 VSSC (power), V3 VSSC (power), V6 VSSC (power), V9 VSSC (power), V12 VSSC (power), V15 VSSC (power), Y1 VSSC (power), Y20 VSSC (power)
part A text: MIU_internal

## TEMPOBJ_1
designator U?, comment ESMT_SPINOR_8-C WSON
NANE: SPINOR_WSON8; Value: ESMT_SPINOR_8-C WSON
footprint BGA4-0_5-0202-1X1
pins: 1 CSZ, 2 SO(IO1), 3 WP#(IO2), 4 VSS, 5 SI(IO0), 6 SCK, 7 HOLD#(IO3), 8 Vcc

## TEMPOBJ_2
designator U?, comment M2273
Value: M2273
pins: 1 VIN, 2 LX, 3 PGND, 4 GND, 5 NC, 6 NC, 7 FB, 8 EN, 9 PG, 10 VIN, 11 LX, 12 PGND

## TEMPOBJ_3
designator U?, comment G2250
Value: G2250
pins: 1 VIN, 2 EN, 3 SCL, 4 SDA, 5 GND, 6 Vout, 7 LX, 8 LX
text: TP

## TEMPOBJ_4
designator U?, comment G918T11
Value: G918T11
pins: 1 IN, 2 GND, 3 SHDN_Z, 4 SET, 5 OUT

## TEMPOBJ_5
designator U?, comment G2262AU1U
Value: G2262AU1U
pins: 1 FB, 2 GND, 3 VIN, 4 LX, 5 EN, 6 OUT

## TEMPOBJ_6
designator R?
pins: 1, 2

## TEMPOBJ_7
designator U?, comment DRV632
Value: DRV632
pins: 1 +INR (io), 2 -INR (io), 3 OUTR (io), 4 GND (io), 5 MUTE_Z (io), 6 VSS (io), 7 CN (io), 8 CP (io), 9 VDD (io), 10 GND (io), 11 UVP (io), 12 OUTL (io), 13 -INL (io), 14 +INL (io)

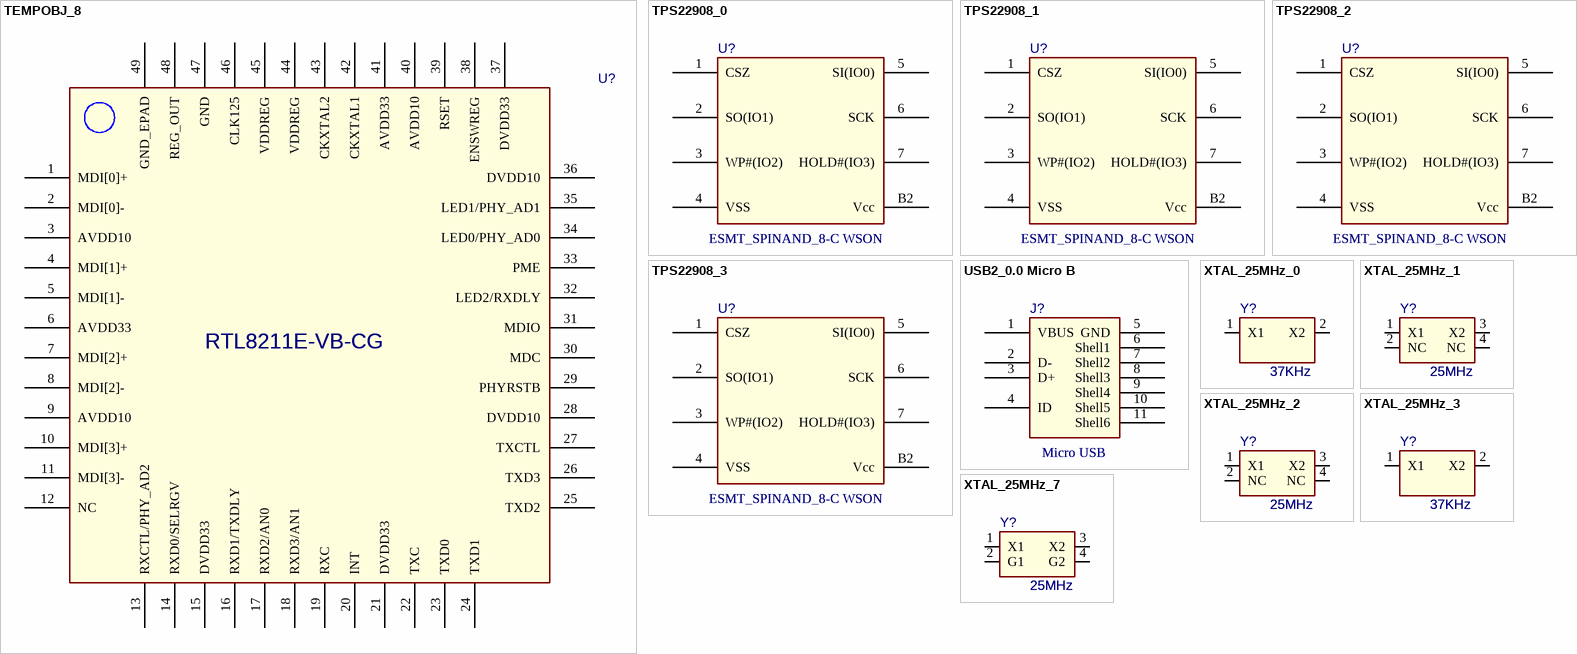
[diagram p49: symbols TEMPOBJ_8 to XTAL_25MHz_7]

## TEMPOBJ_8
designator U?, comment RTL8211E-VB-CG
10/100/1000M PHY WITH RGMII  MAC Interface and Copper line port; Manufacturer: Broadcom; Part Number: B50612EB1KMLG; Cloud IC Number: Y090B5061261; Value: RTL8211E-VB-CG
footprint QFN48-0_5-7X7X1T
pins: 1 MDI[0]+, 2 MDI[0]-, 3 AVDD10, 4 MDI[1]+, 5 MDI[1]-, 6 AVDD33, 7 MDI[2]+, 8 MDI[2]-, 9 AVDD10, 10 MDI[3]+, 11 MDI[3]-, 12 NC, 13 RXCTL/PHY_AD2, 14 RXD0/SELRGV, 15 DVDD33, 16 RXD1/TXDLY, 17 RXD2/AN0, 18 RXD3/AN1, 19 RXC, 20 INT, 21 DVDD33, 22 TXC, 23 TXD0, 24 TXD1, 25 TXD2, 26 TXD3, 27 TXCTL, 28 DVDD10, 29 PHYRSTB, 30 MDC, 31 MDIO, 32 LED2/RXDLY, 33 PME, 34 LED0/PHY_AD0, 35 LED1/PHY_AD1, 36 DVDD10, 37 DVDD33, 38 ENSWREG, 39 RSET, 40 AVDD10, 41 AVDD33, 42 CKXTAL1, 43 CKXTAL2, 44 VDDREG, 45 VDDREG, 46 CLK125, 47 GND, 48 REG_OUT, 49 GND_EPAD

## TPS22908_0
designator U?, comment ESMT_SPINAND_8-C WSON
IC,TPS22908YZTT,BGA4; Cloud IC Number: Y09022908YH7; Value: ESMT_SPINAND_8-C WSON
footprint BGA4-0_5-0202-1X1
pins: 1 CSZ, 2 SO(IO1), 3 WP#(IO2), 4 VSS, 5 SI(IO0), 6 SCK, 7 HOLD#(IO3), B2 Vcc

## TPS22908_1
designator U?, comment ESMT_SPINAND_8-C WSON
IC,TPS22908YZTT,BGA4; Cloud IC Number: Y09022908YH7; Value: ESMT_SPINAND_8-C WSON
footprint BGA4-0_5-0202-1X1
pins: 1 CSZ, 2 SO(IO1), 3 WP#(IO2), 4 VSS, 5 SI(IO0), 6 SCK, 7 HOLD#(IO3), B2 Vcc

## TPS22908_2
designator U?, comment ESMT_SPINAND_8-C WSON
Cloud IC Number: Y09022908YH7; Value: ESMT_SPINAND_8-C WSON
footprint BGA4-0_5-0202-1X1
pins: 1 CSZ, 2 SO(IO1), 3 WP#(IO2), 4 VSS, 5 SI(IO0), 6 SCK, 7 HOLD#(IO3), B2 Vcc

## TPS22908_3
designator U?, comment ESMT_SPINAND_8-C WSON
NANE: SPINAND_WSON8; Value: ESMT_SPINAND_8-C WSON
footprint BGA4-0_5-0202-1X1
pins: 1 CSZ, 2 SO(IO1), 3 WP#(IO2), 4 VSS, 5 SI(IO0), 6 SCK, 7 HOLD#(IO3), B2 Vcc

## USB2_0.0 Micro B
designator J?, comment Micro USB
ÌùÆ¬USBÄ¸×ù£¬7PIN£¬0.65mm£¬7.4*5.25*2.5mm£¬ÎÔÊ½?; Cloud IC Number: Y04210514502; Value: Micro USB
footprint USB-MicroB-SHR-H2_8
pins: 1 VBUS, 2 D-, 3 D+, 4 ID, 5 GND, 6 Shell1, 7 Shell2, 8 Shell3, 9 Shell4, 10 Shell5, 11 Shell6

## XTAL_25MHz_0
designator Y?, comment 37KHz
¾§Ìå 25MHZ,3225·â×° 4PIN,SMT,ÎÞÔ´¾§Õñ,12pF; Part Number: XXCBBCNANF-33.33MHz; Manufacturer: Taitien; MFG1: AVX; BY: DTRUONG-www.amcc.com-02Apr10; Cloud IC Number: Y07425003120; PACKAGE: 3M2X2M5x0M9; Value: 37KHz
footprint SCRY4-3_2X2_5X0_9
pins: 1 X1, 2 X2

## XTAL_25MHz_1
designator Y?, comment 25MHz
¾§Ìå 25MHZ,3225·â×° 4PIN,SMT,ÎÞÔ´¾§Õñ,12pF; Part Number: XXCBBCNANF-33.33MHz; Manufacturer: Taitien; MFG1: AVX; BY: DTRUONG-www.amcc.com-02Apr10; Cloud IC Number: Y07425003120; PACKAGE: 3M2X2M5x0M9; Value: 25MHz
footprint SCRY4-3_2X2_5X0_9
pins: 1 X1, 2 NC, 3 X2, 4 NC

## XTAL_25MHz_2
designator Y?, comment 25MHz
¾§Ìå 25MHZ,3225·â×° 4PIN,SMT,ÎÞÔ´¾§Õñ,12pF; Part Number: XXCBBCNANF-33.33MHz; Manufacturer: Taitien; MFG1: AVX; BY: DTRUONG-www.amcc.com-02Apr10; Cloud IC Number: Y07425003120; PACKAGE: 3M2X2M5x0M9; Value: 25MHz
footprint SCRY4-3_2X2_5X0_9
pins: 1 X1, 2 NC, 3 X2, 4 NC

## XTAL_25MHz_3
designator Y?, comment 37KHz
¾§Ìå 25MHZ,3225·â×° 4PIN,SMT,ÎÞÔ´¾§Õñ,12pF; Part Number: XXCBBCNANF-33.33MHz; Manufacturer: Taitien; MFG1: AVX; BY: DTRUONG-www.amcc.com-02Apr10; Cloud IC Number: Y07425003120; PACKAGE: 3M2X2M5x0M9; Value: 37KHz
footprint SCRY4-3_2X2_5X0_9
pins: 1 X1, 2 X2

## XTAL_25MHz_7
designator Y?, comment 25MHz
¾§Ìå 25MHZ,3225·â×° 4PIN,SMT,ÎÞÔ´¾§Õñ,12pF; Manufacturer: Taitien; Part Number: XXCBBCNANF-33.33MHz; Cloud IC Number: Y07425003120; BY: DTRUONG-www.amcc.com-02Apr10; MFG1: AVX; PACKAGE: 3M2X2M5x0M9; Value: 25MHz
footprint SCRY4-3_2X2_5X0_9
pins: 1 X1, 2 G1, 3 X2, 4 G2